# Altium schematic symbol library MFG01.SCHLIB: 31 symbols
Pins are listed as number, name and electrical type; pins without a type are passive.

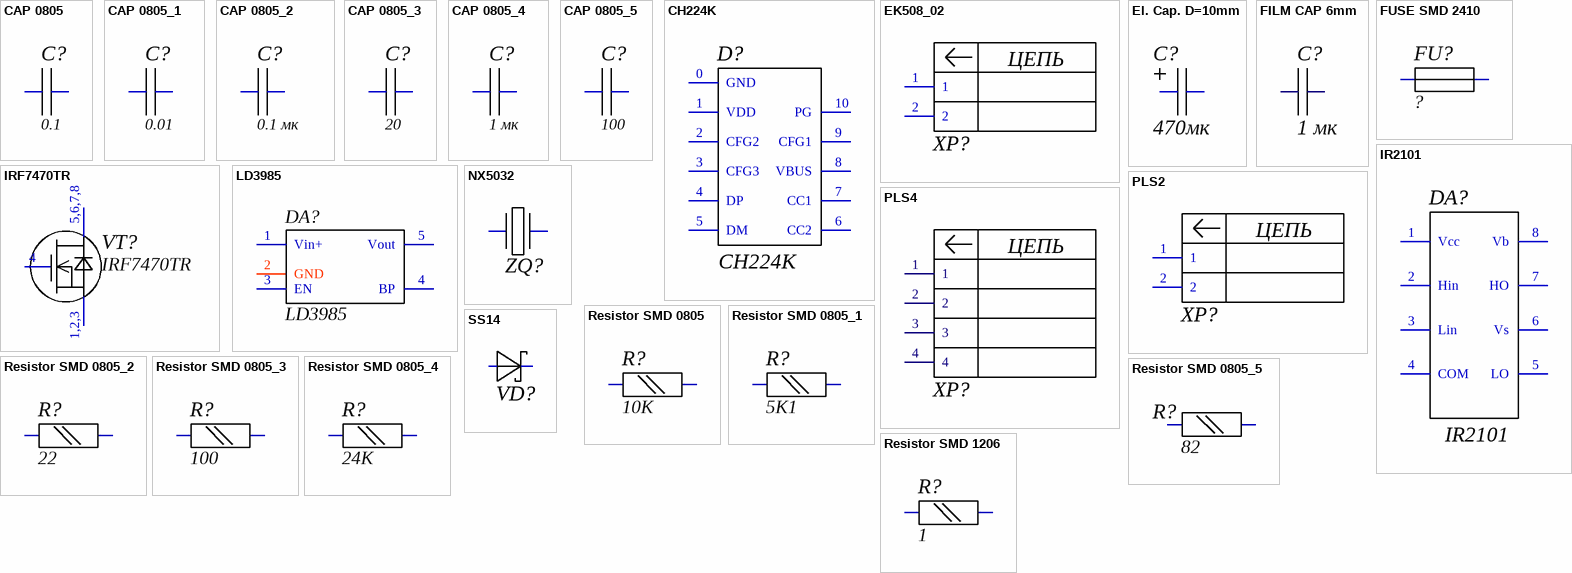
[diagram p0: symbols CAP 0805 to SS14]

## CAP 0805
designator C?, comment 0.1
CAP 0805
footprint C_0805 (Capacitor Pattern)
pins: 1, 2

## CAP 0805_1
designator C?, comment 0.01
CAP 0805
footprint C_0805 (Capacitor Pattern)
pins: 1, 2

## CAP 0805_2
designator C?, comment 0.1 мк
CAP 0805
footprint C_0805 (Capacitor Pattern)
pins: 1, 2

## CAP 0805_3
designator C?, comment 20
CAP 0805
footprint C_0805 (Capacitor Pattern)
pins: 1, 2

## CAP 0805_4
designator C?, comment 1 мк
CAP 0805
footprint C_0805 (Capacitor Pattern)
pins: 1, 2

## CAP 0805_5
designator C?, comment 100
CAP 0805
footprint C_0805 (Capacitor Pattern)
pins: 1, 2

## CH224K
designator D?
supports  PD3.0/2.0,  BC1.2  and  other  boost  fast  charging  protocols
footprint SOIC10 (SOIC 10, Pitch 1.27mm)
pins: 0 GND (power), 1 VDD (power), 2 CFG2 (power), 3 CFG3 (power), 4 DP (power), 5 DM (power), 6 CC2 (power), 7 CC1 (power), 8 VBUS (power), 9 CFG1 (power), 10 PG (power)

## EK508_02
designator XP?  (value not drawn)
footprint EK508_02
pins: 1, 2
text: ЦЕПЬ

## El. Cap. D=10mm
designator C?, comment 470мк
Aluminum Electrolytic Capacitor D=10mm
footprint CAPAE1030X1020N (Capacitor, Aluminium Electrolytric, 10.3mm L X 10.3mm W X 10.2mm H, IPC Medium Density)
pins: 1, 2

## FILM CAP 6mm
designator C?, comment 1 мк
Film capacitor
footprint FILM CAP 6mm (Film Capacitor CBB)
pins: 1, 2

## FUSE SMD 2410
designator FU?, comment ?
FUSE 2410
footprint FUSE BLOCK 2410 (SOT23, 0.95mm pitch; 6 pin, 1.625mm W X 2.90mm L X 1.00mm H body, IPC Medium Density)
pins: 1, 2

## IR2101
designator DA?
Half-Bridge, not invert
footprint SOIC8 (SOIC 8, Pitch 1.27mm - Body 4x5mm, IPC Medium Density)
pins: 1 Vcc, 2 Hin, 3 Lin, 4 COM, 5 LO, 6 Vs, 7 HO, 8 Vb

## IRF7470TR
designator VT?
N-MOSFET 40В 10А 2.5Вт
footprint SOIC8 (SOIC 8, Pitch 1.27mm - Body 4x5mm, IPC Medium Density)
pins: 1,2,3 S, 4 G, 5,6,7,8 D

## LD3985
designator DA?
Ultra low drop and low noise BiCMOS voltage regulator
footprint SOT95P280X100-5N (SOT23, 0.95mm pitch; 5 pin, 1.625mm W X 2.9mm L, IPC Medium Density)
pins: 1 Vin+, 2 GND, 3 EN, 4 BP, 5 Vout

## NX5032
designator ZQ?  (value not drawn)
Resonator SMD
footprint NX5032
pins: 1, 2

## PLS2
designator XP?  (value not drawn)
footprint PLS-2
pins: 1, 2
text: ЦЕПЬ

## PLS4
designator XP?  (value not drawn)
footprint PLS-4
pins: 1, 2, 3, 4
text: ЦЕПЬ

## Resistor SMD 0805
designator R?, comment 10K
Resistor SMD 0805
footprint R_0805 (Resistor Pattern)
pins: 1, 2

## Resistor SMD 0805_1
designator R?, comment 5K1
Resistor SMD 0805
footprint R_0805 (Resistor Pattern)
pins: 1, 2

## Resistor SMD 0805_2
designator R?, comment 22
Resistor SMD 0805
footprint R_0805 (Resistor Pattern)
pins: 1, 2

## Resistor SMD 0805_3
designator R?, comment 100
Resistor SMD 0805
footprint R_0805 (Resistor Pattern)
pins: 1, 2

## Resistor SMD 0805_4
designator R?, comment 24K
Resistor SMD 0805
footprint R_0805 (Resistor Pattern)
pins: 1, 2

## Resistor SMD 0805_5
designator R?, comment 82
Resistor SMD 0805
footprint R_0805 (Resistor Pattern)
pins: 1, 2

## Resistor SMD 1206
designator R?, comment 1
Resistor SMD 1206
footprint R_1206
pins: 1, 2

## SS14
designator VD?  (value not drawn)
Schottky Barrier Rectifier
footprint DO-214 (DO-214-AC/SMA Diode, Molded Body; 5.195mm L X 2.605mm W X 2.30mm H, IPC Medium Density)
pins: 1 К "Катод", 2 А "Анод"

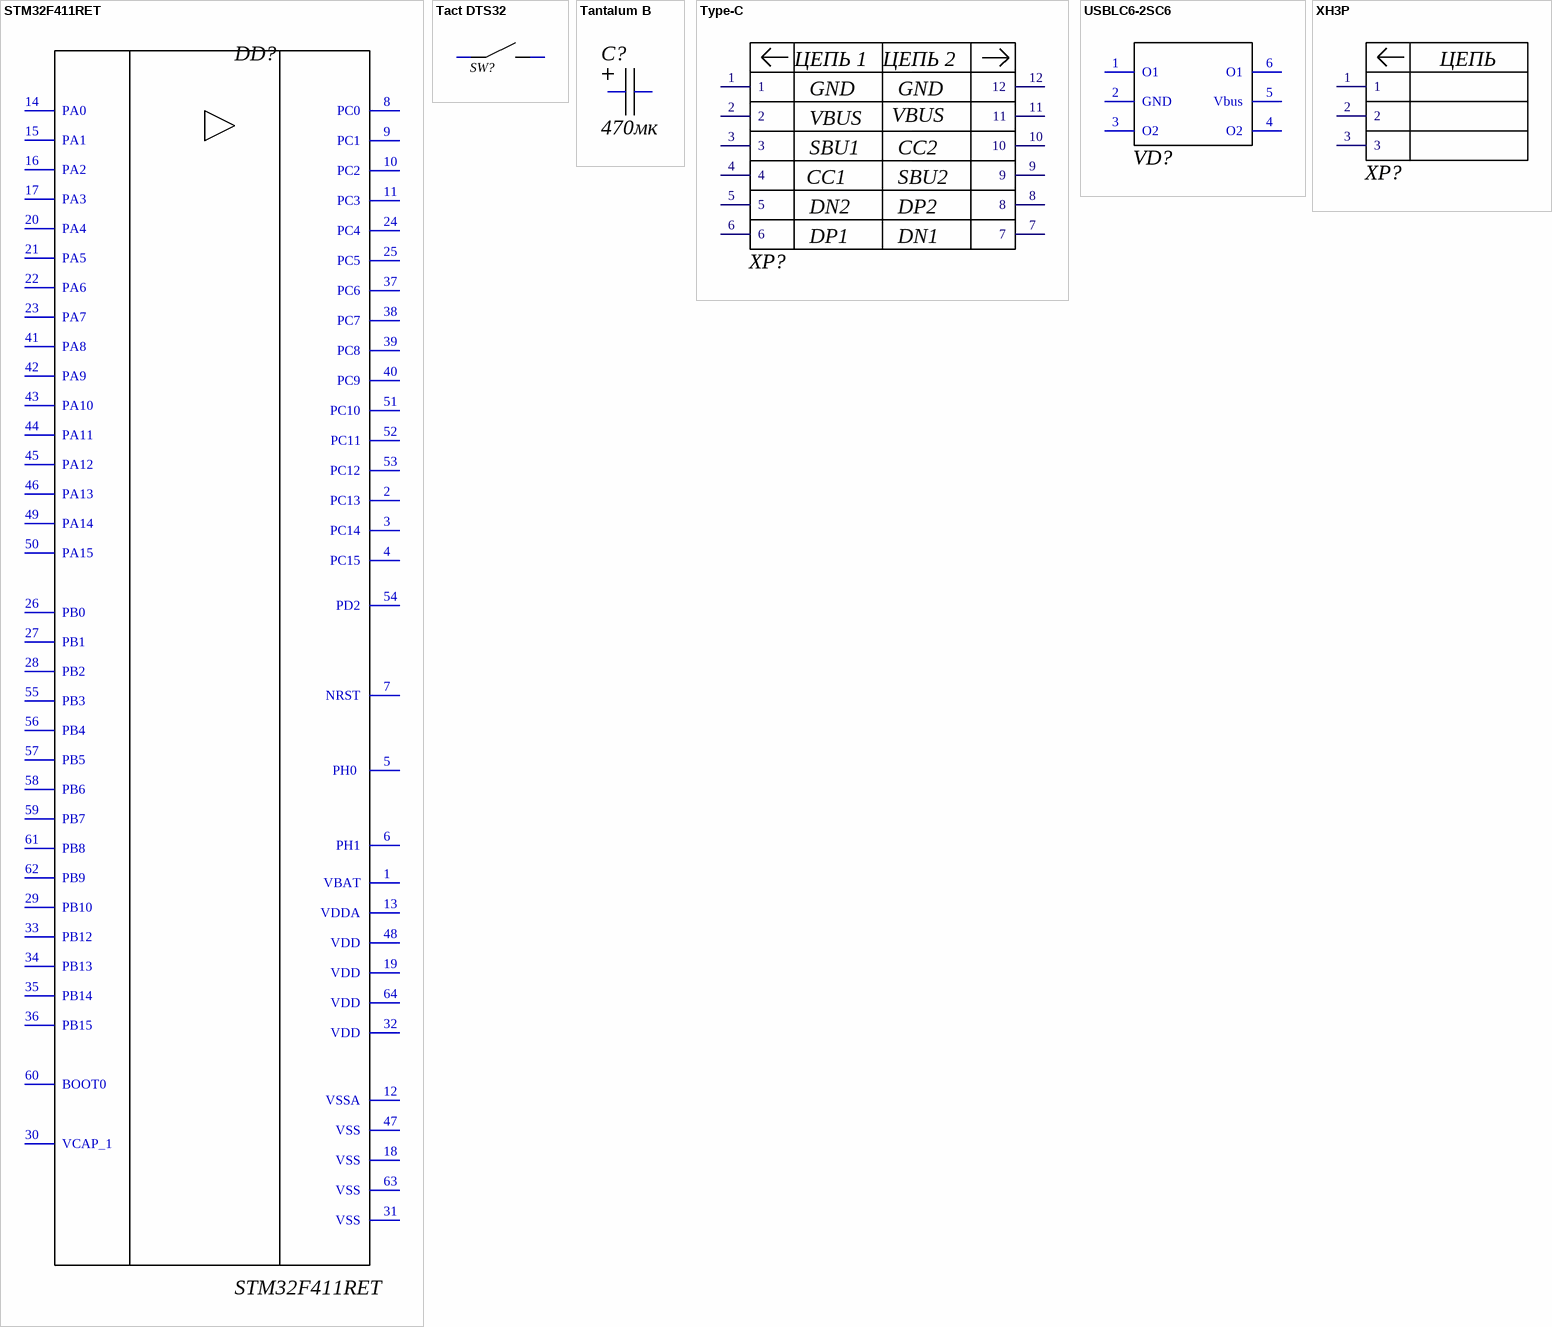
[diagram p1: symbols STM32F411RET to XH3P]

## STM32F411RET
designator DD?
Performance line, ARM-based 32-bit MCU
footprint LQFP64 (TSQFP, 64-Leads, Body 10,00x10,00mm, Pitch 0,50mm, IPC Medium Density)
pins: 1 VBAT, 2 PC13, 3 PC14, 4 PC15, 5 PH0 , 6 PH1, 7 NRST, 8 PC0, 9 PC1, 10 PC2, 11 PC3, 12 VSSA, 13 VDDA, 14 PA0, 15 PA1, 16 PA2, 17 PA3, 18 VSS, 19 VDD, 20 PA4, 21 PA5, 22 PA6, 23 PA7, 24 PC4, 25 PC5, 26 PB0, 27 PB1, 28 PB2, 29 PB10, 30 VCAP_1, 31 VSS, 32 VDD, 33 PB12, 34 PB13, 35 PB14, 36 PB15, 37 PC6, 38 PC7, 39 PC8, 40 PC9, 41 PA8, 42 PA9, 43 PA10, 44 PA11, 45 PA12, 46 PA13, 47 VSS, 48 VDD, 49 PA14, 50 PA15, 51 PC10, 52 PC11, 53 PC12, 54 PD2, 55 PB3, 56 PB4, 57 PB5, 58 PB6, 59 PB7, 60 BOOT0, 61 PB8, 62 PB9, 63 VSS, 64 VDD

## Tact DTS32
designator SW?  (value not drawn)
footprint TACT DTS-32
pins: 1, 2

## Tantalum B
designator C?, comment 470мк
Tantalum B
footprint Tantalum B
pins: 1, 2

## Type-C
designator XP?  (value not drawn)
footprint TYPE-C
pins: 1, 2, 3, 4, 5, 6, 7, 8, 9, 10, 11, 12
text: ЦЕПЬ 1; ЦЕПЬ 2; GND; VBUS; SBU1; CC2; CC1; SBU2; DN2; DP2; DP1; DN1

## USBLC6-2SC6
designator VD?  (value not drawn)
Very low capacitance ESD protection
footprint SSOT-6 (SOT23, 0.95mm pitch; 6 pin, 1.625mm W X 2.90mm L X 1.00mm H body, IPC Medium Density)
pins: 1 O1, 2 GND, 3 O2, 4 O2, 5 Vbus, 6 O1

## XH3P
designator XP?  (value not drawn)
PLS3
footprint XH3P
pins: 1, 2, 3
text: ЦЕПЬ